# Altium footprint library HFJ11-1G01E-L12RL.PcbLib: 1 footprints
Each footprint in its own frame and in the unit in brackets; x right, y up, seen from the top. Pads: shape width x height; smd on the part's side, far side on the other; paste and mask are expansions set on the pad; w line width, h text height; cw(c..) or ccw(c..) is an arc to the next point about the centre after c.
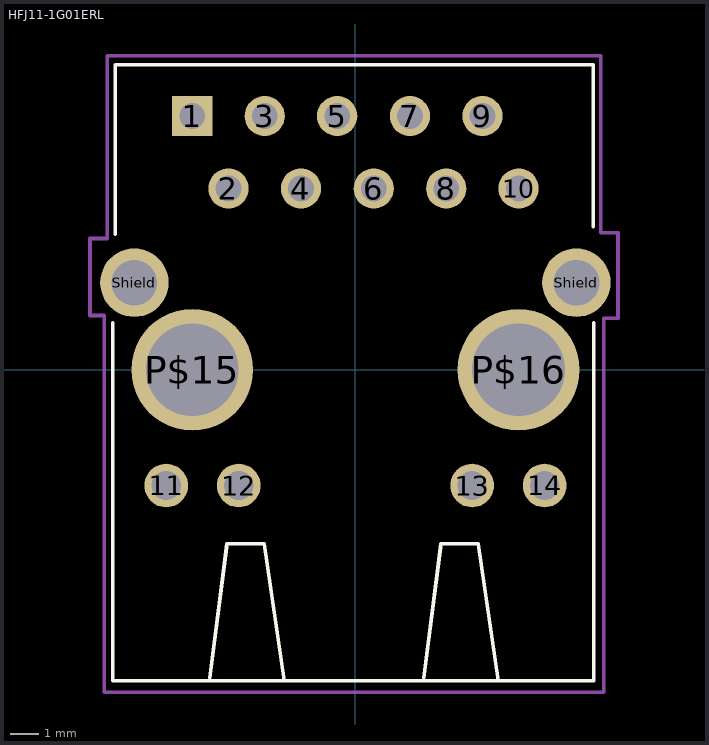
[diagram p0: the footprint, top view; thin cyan lines are the x and y axes]

## HFJ11-1G01ERL [mm] "HFJ11-1G01ERL"
pads (18):
  rect 1.408x1.408 hole 0.9: 1(-5.72,8.89)
  round 1.408 hole 0.9: 2(-4.45,6.35) 3(-3.18,8.89) 4(-1.91,6.35) 5(-0.64,8.89) 6(0.64,6.35) 7(1.91,8.89) 8(3.18,6.35) 9(4.45,8.89) 10(5.72,6.35)
  round 1.53 hole 1.02: 11(-6.63,-4.06) 12(-4.09,-4.06) 13(4.09,-4.06) 14(6.63,-4.06)
  round 4.266 hole 3.25: P$15(-5.715,0) P$16(5.715,0)
  round 2.4 hole 1.6: Shield(-7.745,3.05) Shield(7.745,3.05)
Top Overlay:
  lines w0.127: -8.498,1.65 -8.498,-10.9 -2.5,-10.9 ; -8.422,4.751 -8.422,10.69 8.33,10.69 8.33,5.005 ; -5.1,-10.8 -4.5,-6.1 -3.2,-6.1 -2.5,-10.9 ; 2.4,-10.8 3,-6.1 4.3,-6.1 5,-10.9 ; 8.35,1.65 8.35,-10.9 -2.5,-10.9
Mechanical 15:
  lines w0.127: -9.3,1.9 -8.8,1.9 -8.8,-11.3 8.7,-11.3 8.7,1.8 9.2,1.8 9.2,4.8 8.6,4.8 8.6,11 -8.7,11 -8.7,4.6 -9.3,4.6 -9.3,1.9
3D body "HFJ11-1G01E-L12RL.STEP": height 16.32, standoff -3.53, extent -9.507,-10.897 10.176,10.693